# Altium footprint library LimeMicroAltiumLib.PcbLib: 876 footprints (part 40 of 57)
Each footprint in its own frame and in the unit in brackets; x right, y up, seen from the top. Pads: shape width x height; smd on the part's side, far side on the other; paste and mask are expansions set on the pad; w line width, h text height; cw(c..) or ccw(c..) is an arc to the next point about the centre after c.
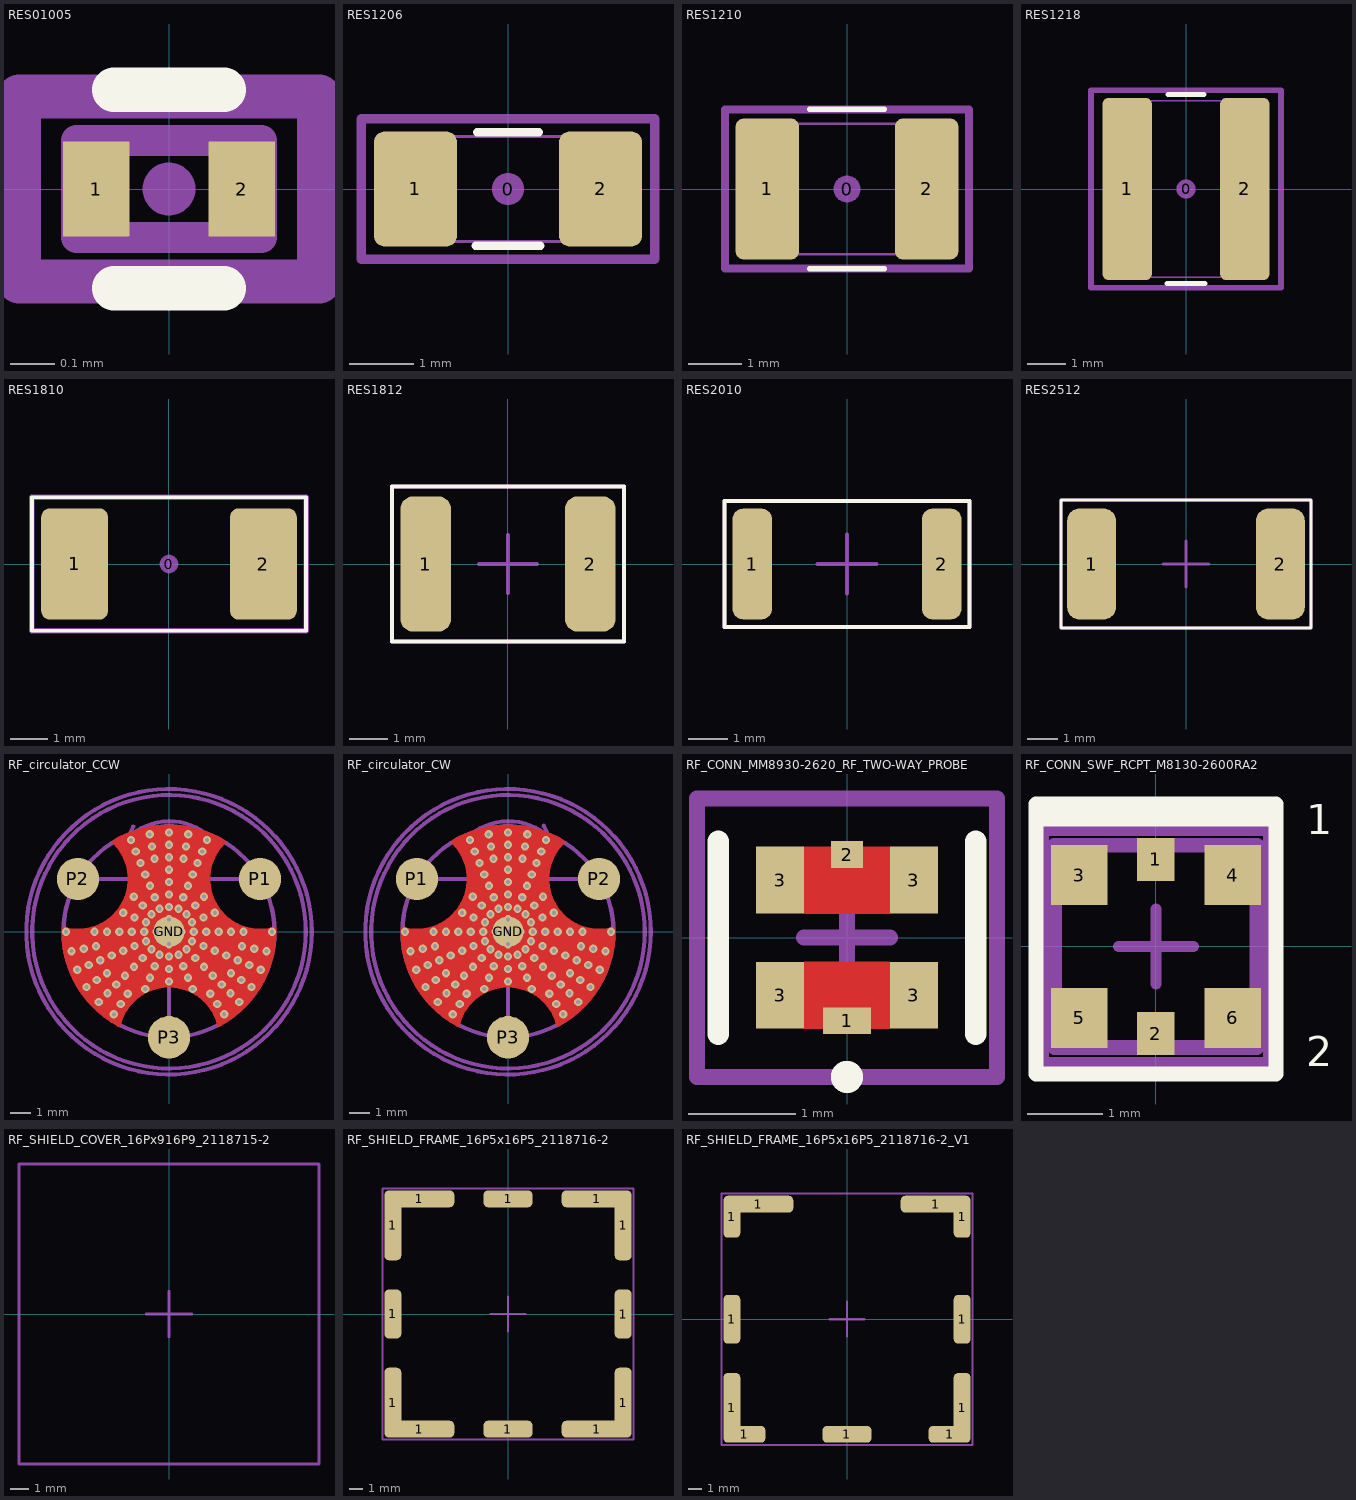
[diagram p39: the footprints below, top view; thin cyan lines are the x and y axes]

## RES01005 [mm]
pads (2):
  rect 0.15x0.215 smd paste+0 mask+0.03: 1(-0.165,0) 2(0.165,0)
Top Overlay:
  lines w0.1: -0.125,-0.225 0.125,-0.225 ; -0.125,0.225 0.125,0.225
Mechanical 13:
  lines w0.07: -0.21,-0.11 -0.21,0.11 0.21,0.11 0.21,-0.11 -0.21,-0.11
Mechanical 15:
  circle w0.07: c0,0 r0.025
  lines w0.1: -0.34,-0.21 -0.34,0.21 0.34,0.21 0.34,-0.21 -0.34,-0.21
  text ".Designator" at 0,0 h0.55
3D body "User Library-res01005.step": height 0.14, standoff 0, extent -0.2,-0.1 0.2,0.1

## RES1206 [mm] "Chip Resistor, Body 3.2x1.6mm, 1206, IPC Medium Density"
height 0.7
pads (3):
  round 0.508 on Mech15: 0(0,0)
  rrect25% 1.3x1.8 smd: 1(-1.45,0) 2(1.45,0)
Top Overlay:
  lines w0.127: -0.508,-0.889 0.508,-0.889 ; -0.483,0.889 0.483,0.889
Mechanical 13:
  lines w0.05: 1.025,-0.824 -1.025,-0.824 1.025,-0.824 ; -1.625,-0.825 -1.625,0.825 -1.025,0.825 -1.025,-0.825 -1.625,-0.825 ; -1.025,0.824 1.025,0.824 -1.025,0.824 ; 1.025,-0.825 1.625,-0.825 1.625,0.825 1.025,0.825 1.025,-0.825
Mechanical 15:
  lines w0.15: -2.3,-1.1 2.3,-1.1 2.3,1.1 -2.3,1.1 -2.3,-1.1
  text ".Designator" at 0,0 h0.55
3D body "RES 1206 (3216 metric).STEP": height 0.69, standoff -0.01, extent -1.625,-0.825 1.625,0.825

## RES1210 [mm] "Chip Resistor, Body 3.2x1.6mm, 1206, IPC Medium Density"
height 0.7
pads (3):
  round 0.508 on Mech15: 0(0,0)
  rrect25% 1.2x2.65 smd: 1(-1.5,0) 2(1.5,0)
Top Overlay:
  lines w0.1: -0.7,-1.5 0.7,-1.5 ; -0.7,1.5 0.7,1.5
Mechanical 13:
  lines w0.05: -1.2,-1.25 -1.6,-1.25 -1.6,1.25 -1.2,1.25 ; 1.2,-1.25 1.6,-1.25 1.6,1.25 1.2,1.25 ; -1.2,-1.23 -1.2,1.23 1.2,1.23 1.2,-1.23 -1.2,-1.23
Mechanical 15:
  lines w0.15: -2.3,-1.5 2.3,-1.5 2.3,1.5 -2.3,1.5 -2.3,-1.5
  text ".Designator" at 0,0 h0.55
3D body "1839737.stp": height 0.54, standoff -0.01, extent -1.55,-1.3 1.55,1.3

## RES1218 [mm] "Chip Resistor, Body 3.2x1.6mm, 1206, IPC Medium Density"
height 0.7
pads (3):
  round 0.508 on Mech15: 0(0,0)
  rrect25% 1.3x4.8 smd: 1(-1.55,0) 2(1.55,0)
Top Overlay:
  lines w0.127: -0.508,-2.489 0.508,-2.489 ; -0.483,2.489 0.483,2.489
Mechanical 13:
  lines w0.05: -1.025,2.325 -1.625,2.325 -1.625,-2.325 -1.025,-2.325 -1.025,2.324 ; 1.025,-2.325 1.537,-2.325 1.5,2.325 1.025,2.325 ; -1.025,2.324 1.025,2.324 ; -1.025,2.324 1.025,2.324 ; 1.025,-2.324 -1.025,-2.324 1.025,-2.324 ; 1.025,-2.324 1.025,2.324
Mechanical 15:
  lines w0.15: -2.5,-2.6 2.5,-2.6 2.5,2.6 -2.5,2.6 -2.5,-2.6
  text ".Designator" at 0,0 h0.55
3D body "User Library-wk732j.step": height 0.61, standoff 0, extent -1.6,-2.3 1.5,2.3

## RES1810 [mm]
height 0.7
pads (3):
  round 0.508 on Mech15: 0(0,0)
  rrect25% 1.8x3 smd: 1(-2.55,0) 2(2.55,0)
Top Overlay:
  lines w0.1: -3.7,-1.8 -3.7,1.8 3.7,1.8 3.7,-1.8 -3.7,-1.8
Mechanical 15:
  lines w0.15: -3.7,-1.8 3.7,-1.8 3.7,1.8 -3.7,1.8 -3.7,-1.8
  text ".Designator" at 0,0 h0.55
3D body: height 2.55, standoff 0, extent 1.4,-1.3 2.3,1.3
3D body: height 2.5, standoff 0, extent -2.25,-1.25 2.25,1.25
3D body: height 2.55, standoff 0, extent -2.3,-1.3 -1.4,1.3

## RES1812 [mm]
pads (2):
  rrect50% 1.3x3.5 smd mask+0.05: 1(-2.125,0) 2(2.125,0)
Top Overlay:
  lines w0.1: -3,-2 3,-2 3,2 -3,2 -3,-2
Mechanical 15:
  lines w0.1: -0.75,0 0,0 ; 0,-0.75 0,0 ; 0,0.75 0,0 ; 0.75,0 0,0 ; -3,-2 -3,2 3,2 3,-2 -3,-2
  text ".Designator" at 0,0 h0.55
3D body "User Library-1812.step": height 0.58, standoff 0.02, extent -2.25,-1.6 2.25,1.6

## RES2010 [mm]
pads (2):
  rrect50% 1x2.8 smd mask+0.05: 1(-2.4,0) 2(2.4,0)
Top Overlay:
  lines w0.1: -3.1,-1.6 3.1,-1.6 3.1,1.6 -3.1,1.6 -3.1,-1.6
Mechanical 15:
  lines w0.1: -0.75,0 0,0 ; 0,-0.75 0,0 ; 0,0.75 0,0 ; 0.75,0 0,0 ; -3.1,-1.6 -3.1,1.6 3.1,1.6 3.1,-1.6 -3.1,-1.6
  text ".Designator" at 0,0 h0.55
3D body "User Library-2010.step": height 0.53, standoff -0.03, extent -2.5,-1.25 2.5,1.25

## RES2512 [mm]
pads (2):
  rrect50% 1.6x3.65 smd mask+0.05: 1(-3.1,0) 2(3.1,0)
Top Overlay:
  lines w0.1: -4.1,-2.1 4.1,-2.1 4.1,2.1 -4.1,2.1 -4.1,-2.1
Mechanical 15:
  lines w0.1: -0.75,0 0,0 ; 0,-0.75 0,0 ; 0,0.75 0,0 ; 0.75,0 0,0 ; -4.1,-2.1 -4.1,2.1 4.1,2.1 4.1,-2.1 -4.1,-2.1
  text ".Designator" at 0,0 h0.55
3D body "User Library-res2512_body.step": height 0.62, standoff 0, extent -3.159,-1.6 3.16,1.6

## RF_circulator_CCW [mm]
pads (4):
  round 1.5 smd mask+0.05: GND(0,0)
  round 2.05 smd mask+0.05: P1(4.4,2.55) P2(-4.4,2.55) P3(0,-5.1)
via 3.991,-2.667 diameter 0.4 hole 0.2
via 3.492,-2.333 diameter 0.4 hole 0.2
via 2.993,-2 diameter 0.4 hole 0.2
via -3.991,-2.667 diameter 0.4 hole 0.2
via -3.492,-2.333 diameter 0.4 hole 0.2
via -2.993,-2 diameter 0.4 hole 0.2
via -0.936,4.707 diameter 0.4 hole 0.2
via -0.819,4.119 diameter 0.4 hole 0.2
via -0.702,3.53 diameter 0.4 hole 0.2
via 0.702,3.53 diameter 0.4 hole 0.2
via 0.819,4.119 diameter 0.4 hole 0.2
via 0.936,4.707 diameter 0.4 hole 0.2
via 2,-2.993 diameter 0.4 hole 0.2
via 2.333,-3.492 diameter 0.4 hole 0.2
via 2.667,-3.991 diameter 0.4 hole 0.2
via 3.53,-0.702 diameter 0.4 hole 0.2
via 4.119,-0.819 diameter 0.4 hole 0.2
via 4.707,-0.936 diameter 0.4 hole 0.2
via -3.531,-0.702 diameter 0.4 hole 0.2
via -4.119,-0.819 diameter 0.4 hole 0.2
via -4.707,-0.936 diameter 0.4 hole 0.2
via -2.546,-2.545 diameter 0.4 hole 0.2
via -2.97,-2.97 diameter 0.4 hole 0.2
via -3.394,-3.394 diameter 0.4 hole 0.2
via 0.689,1.662 diameter 0.4 hole 0.2
via 0.918,2.217 diameter 0.4 hole 0.2
via 1.836,4.434 diameter 0.4 hole 0.2
via 1.607,3.88 diameter 0.4 hole 0.2
via 1.377,3.325 diameter 0.4 hole 0.2
via 1.148,2.771 diameter 0.4 hole 0.2
via 0.459,1.108 diameter 0.4 hole 0.2
via -0.689,1.663 diameter 0.4 hole 0.2
via -0.918,2.217 diameter 0.4 hole 0.2
via -1.837,4.434 diameter 0.4 hole 0.2
via -1.607,3.88 diameter 0.4 hole 0.2
via -1.378,3.326 diameter 0.4 hole 0.2
via -1.148,2.771 diameter 0.4 hole 0.2
via -0.459,1.108 diameter 0.4 hole 0.2
via 1.663,0.688 diameter 0.4 hole 0.2
via 2.217,0.918 diameter 0.4 hole 0.2
via 1.108,0.459 diameter 0.4 hole 0.2
via -1.663,0.689 diameter 0.4 hole 0.2
via -2.217,0.918 diameter 0.4 hole 0.2
via -1.108,0.459 diameter 0.4 hole 0.2
via 0.688,-1.663 diameter 0.4 hole 0.2
via 0.918,-2.217 diameter 0.4 hole 0.2
via 1.148,-2.771 diameter 0.4 hole 0.2
via 0.459,-1.109 diameter 0.4 hole 0.2
via 1.662,-0.689 diameter 0.4 hole 0.2
via 2.217,-0.919 diameter 0.4 hole 0.2
via 4.434,-1.837 diameter 0.4 hole 0.2
via 3.88,-1.607 diameter 0.4 hole 0.2
via 3.325,-1.378 diameter 0.4 hole 0.2
via 2.771,-1.148 diameter 0.4 hole 0.2
via 1.108,-0.459 diameter 0.4 hole 0.2
via -1.663,-0.689 diameter 0.4 hole 0.2
via -2.217,-0.919 diameter 0.4 hole 0.2
via -4.434,-1.837 diameter 0.4 hole 0.2
via -3.88,-1.607 diameter 0.4 hole 0.2
via -3.326,-1.378 diameter 0.4 hole 0.2
via -2.771,-1.148 diameter 0.4 hole 0.2
via -1.108,-0.459 diameter 0.4 hole 0.2
via -0.459,-1.109 diameter 0.4 hole 0.2
via -1.273,-1.273 diameter 0.4 hole 0.2
via -1.697,-1.697 diameter 0.4 hole 0.2
via -0.848,-0.849 diameter 0.4 hole 0.2
via -2.667,-3.991 diameter 0.4 hole 0.2
via -2.333,-3.492 diameter 0.4 hole 0.2
via -2,-2.993 diameter 0.4 hole 0.2
via -2.121,-2.121 diameter 0.4 hole 0.2
via -1.148,-2.771 diameter 0.4 hole 0.2
via 2.121,-2.121 diameter 0.4 hole 0.2
via 2.545,-2.546 diameter 0.4 hole 0.2
via 2.969,-2.97 diameter 0.4 hole 0.2
via 3.394,-3.394 diameter 0.4 hole 0.2
via -0.849,0.848 diameter 0.4 hole 0.2
via -1.697,1.697 diameter 0.4 hole 0.2
via -1.273,1.273 diameter 0.4 hole 0.2
via 0.848,0.849 diameter 0.4 hole 0.2
via 1.697,1.697 diameter 0.4 hole 0.2
via 1.273,1.273 diameter 0.4 hole 0.2
via 0.848,-0.848 diameter 0.4 hole 0.2
via 1.697,-1.697 diameter 0.4 hole 0.2
via 1.273,-1.273 diameter 0.4 hole 0.2
via -0.918,-2.217 diameter 0.4 hole 0.2
via -0.689,-1.663 diameter 0.4 hole 0.2
via 0,-1.8 diameter 0.4 hole 0.2
via 0,-2.4 diameter 0.4 hole 0.2
via 0,-1.2 diameter 0.4 hole 0.2
via 1.2,0 diameter 0.4 hole 0.2
via 0,0 diameter 0.4 hole 0.2
via 0.6,0 diameter 0.4 hole 0.2
via 4.975,0 diameter 0.4 hole 0.2
via 3.6,0 diameter 0.4 hole 0.2
via 3,0 diameter 0.4 hole 0.2
via 2.4,0 diameter 0.4 hole 0.2
via 1.8,0 diameter 0.4 hole 0.2
via -1.2,0 diameter 0.4 hole 0.2
via -1.8,0 diameter 0.4 hole 0.2
via -2.4,0 diameter 0.4 hole 0.2
via -3,0 diameter 0.4 hole 0.2
via -3.6,0 diameter 0.4 hole 0.2
via -4.975,0 diameter 0.4 hole 0.2
via 0,3.6 diameter 0.4 hole 0.2
via 0,4.2 diameter 0.4 hole 0.2
via 0,4.8 diameter 0.4 hole 0.2
via 0,3 diameter 0.4 hole 0.2
via 0,2.4 diameter 0.4 hole 0.2
via 0,1.8 diameter 0.4 hole 0.2
via 0,1.2 diameter 0.4 hole 0.2
via -0.6,0 diameter 0.4 hole 0.2
via 0,-0.6 diameter 0.4 hole 0.2
via 0,0.6 diameter 0.4 hole 0.2
Top Layer:
  region: -2.425,-4.494
  region: -2.45,0.1 -5.137,0.1 -5.143,-0.251 -5.061,-0.95 -4.885,-1.63 -4.617,-2.281 -4.263,-2.888 -3.83,-3.442 -3.326,-3.932 -2.759,-4.348 -2.45,-4.516
  region: 2.449,0.1 5.135,0.1 5.142,-0.251 5.059,-0.949 4.882,-1.628 4.614,-2.278 4.26,-2.885 3.827,-3.438 3.323,-3.927 2.757,-4.342 2.449,-4.51
  region: 0.05,4.375 -2.674,4.375 -2.369,4.556 -1.718,4.834 -1.035,5.021 -0.333,5.116 0.375,5.116 1.077,5.021 1.759,4.834 2.411,4.556 2.715,4.375
  region: -3.793,0.1
  region: -2.684,4.375 -2.125,3.7 -1.875,2.875 -1.9,2.025 -2.15,1.4 -2.45,0.925 -3,0.425 -3.793,0.1 -3.65,-1 0,-1 0,4.375
  region: 2.684,4.375 2.125,3.7 1.875,2.875 1.9,2.025 2.15,1.4 2.45,0.925 3,0.425 3.793,0.1 3.65,-1 0,-1 0,4.375
  region: -2.425,-4.494 -2.2,-3.85 -1.7,-3.225 -1.025,-2.8 -0.475,-2.625 0,-2.625 0,-1 -2.605,-1 -2.605,-4.494
  region: 2.425,-4.494 2.2,-3.85 1.7,-3.225 1.025,-2.8 0.475,-2.625 0,-2.625 0,-1 2.605,-1 2.605,-4.494
  lines w0.2: -5.104,0.148 ccw(c0,0) -2.425,-4.494 cw(c0,-5.1) 2.424,-4.488 ccw(c-0.001,0.006) 5.103,0.154 ; -5.093,0.148 ccw(c-4.4,2.55) -2.657,4.342 cw(c0,0) 2.657,4.342 ccw(c4.4,2.55) 5.093,0.148
Top Paste:
  drawing of 48 lines, arcs and shapes, not listed
Top Solder:
  drawing of 48 lines, arcs and shapes, not listed
Mechanical 13:
  circle w0.2: c0,0 r5.1
  circle w0.2: c0,0 r6.61
  lines w0.2: -4.4,2.55 4.4,2.55 ; 0,-5.1 0,0 0,2.55
Mechanical 15:
  circle w0.2: c0,0 r6.899
  lines w0.2: -1.73,5.079 -2.005,4.504 ; -1.455,4.579 -2.005,4.504 ; -0.925,0 0,0 ; 0,-0.925 0,0 ; 0,0.925 0,0 ; 0.925,0 0,0 ; 2,4.55 ccw(c0.021,2.479) -2.005,4.504
  text ".Designator" at 0,0 h0.55
  text "P2" at -4.8,2.35 h0.55
  text "P1" at 4.1,2.35 h0.55
  text "P3" at -0.45,-5.35 h0.55
3D body: height 7, standoff 0, extent -5,-5 5,5

## RF_circulator_CW [mm]
pads (4):
  round 1.5 smd mask+0.05: GND(0,0)
  round 2.05 smd mask+0.05: P1(-4.4,2.55) P2(4.4,2.55) P3(0,-5.1)
via 0,0.6 diameter 0.4 hole 0.2
via 0,-0.6 diameter 0.4 hole 0.2
via -0.6,0 diameter 0.4 hole 0.2
via 0,1.2 diameter 0.4 hole 0.2
via 0,1.8 diameter 0.4 hole 0.2
via 0,2.4 diameter 0.4 hole 0.2
via 0,3 diameter 0.4 hole 0.2
via 0,4.8 diameter 0.4 hole 0.2
via 0,4.2 diameter 0.4 hole 0.2
via 0,3.6 diameter 0.4 hole 0.2
via -4.975,0 diameter 0.4 hole 0.2
via -3.6,0 diameter 0.4 hole 0.2
via -3,0 diameter 0.4 hole 0.2
via -2.4,0 diameter 0.4 hole 0.2
via -1.8,0 diameter 0.4 hole 0.2
via -1.2,0 diameter 0.4 hole 0.2
via 1.8,0 diameter 0.4 hole 0.2
via 2.4,0 diameter 0.4 hole 0.2
via 3,0 diameter 0.4 hole 0.2
via 3.6,0 diameter 0.4 hole 0.2
via 4.975,0 diameter 0.4 hole 0.2
via 0.6,0 diameter 0.4 hole 0.2
via 0,0 diameter 0.4 hole 0.2
via 1.2,0 diameter 0.4 hole 0.2
via 0,-1.2 diameter 0.4 hole 0.2
via 0,-2.4 diameter 0.4 hole 0.2
via 0,-1.8 diameter 0.4 hole 0.2
via -0.689,-1.663 diameter 0.4 hole 0.2
via -0.918,-2.217 diameter 0.4 hole 0.2
via 1.273,-1.273 diameter 0.4 hole 0.2
via 1.697,-1.697 diameter 0.4 hole 0.2
via 0.848,-0.848 diameter 0.4 hole 0.2
via 1.273,1.273 diameter 0.4 hole 0.2
via 1.697,1.697 diameter 0.4 hole 0.2
via 0.848,0.849 diameter 0.4 hole 0.2
via -1.273,1.273 diameter 0.4 hole 0.2
via -1.697,1.697 diameter 0.4 hole 0.2
via -0.849,0.848 diameter 0.4 hole 0.2
via 3.394,-3.394 diameter 0.4 hole 0.2
via 2.969,-2.97 diameter 0.4 hole 0.2
via 2.545,-2.546 diameter 0.4 hole 0.2
via 2.121,-2.121 diameter 0.4 hole 0.2
via -1.148,-2.771 diameter 0.4 hole 0.2
via -2.121,-2.121 diameter 0.4 hole 0.2
via -2,-2.993 diameter 0.4 hole 0.2
via -2.333,-3.492 diameter 0.4 hole 0.2
via -2.667,-3.991 diameter 0.4 hole 0.2
via -0.848,-0.849 diameter 0.4 hole 0.2
via -1.697,-1.697 diameter 0.4 hole 0.2
via -1.273,-1.273 diameter 0.4 hole 0.2
via -0.459,-1.109 diameter 0.4 hole 0.2
via -1.108,-0.459 diameter 0.4 hole 0.2
via -2.771,-1.148 diameter 0.4 hole 0.2
via -3.326,-1.378 diameter 0.4 hole 0.2
via -3.88,-1.607 diameter 0.4 hole 0.2
via -4.434,-1.837 diameter 0.4 hole 0.2
via -2.217,-0.919 diameter 0.4 hole 0.2
via -1.663,-0.689 diameter 0.4 hole 0.2
via 1.108,-0.459 diameter 0.4 hole 0.2
via 2.771,-1.148 diameter 0.4 hole 0.2
via 3.325,-1.378 diameter 0.4 hole 0.2
via 3.88,-1.607 diameter 0.4 hole 0.2
via 4.434,-1.837 diameter 0.4 hole 0.2
via 2.217,-0.919 diameter 0.4 hole 0.2
via 1.662,-0.689 diameter 0.4 hole 0.2
via 0.459,-1.109 diameter 0.4 hole 0.2
via 1.148,-2.771 diameter 0.4 hole 0.2
via 0.918,-2.217 diameter 0.4 hole 0.2
via 0.688,-1.663 diameter 0.4 hole 0.2
via -1.108,0.459 diameter 0.4 hole 0.2
via -2.217,0.918 diameter 0.4 hole 0.2
via -1.663,0.689 diameter 0.4 hole 0.2
via 1.108,0.459 diameter 0.4 hole 0.2
via 2.217,0.918 diameter 0.4 hole 0.2
via 1.663,0.688 diameter 0.4 hole 0.2
via -0.459,1.108 diameter 0.4 hole 0.2
via -1.148,2.771 diameter 0.4 hole 0.2
via -1.378,3.326 diameter 0.4 hole 0.2
via -1.607,3.88 diameter 0.4 hole 0.2
via -1.837,4.434 diameter 0.4 hole 0.2
via -0.918,2.217 diameter 0.4 hole 0.2
via -0.689,1.663 diameter 0.4 hole 0.2
via 0.459,1.108 diameter 0.4 hole 0.2
via 1.148,2.771 diameter 0.4 hole 0.2
via 1.377,3.325 diameter 0.4 hole 0.2
via 1.607,3.88 diameter 0.4 hole 0.2
via 1.836,4.434 diameter 0.4 hole 0.2
via 0.918,2.217 diameter 0.4 hole 0.2
via 0.689,1.662 diameter 0.4 hole 0.2
via -3.394,-3.394 diameter 0.4 hole 0.2
via -2.97,-2.97 diameter 0.4 hole 0.2
via -2.546,-2.545 diameter 0.4 hole 0.2
via -4.707,-0.936 diameter 0.4 hole 0.2
via -4.119,-0.819 diameter 0.4 hole 0.2
via -3.531,-0.702 diameter 0.4 hole 0.2
via 4.707,-0.936 diameter 0.4 hole 0.2
via 4.119,-0.819 diameter 0.4 hole 0.2
via 3.53,-0.702 diameter 0.4 hole 0.2
via 2.667,-3.991 diameter 0.4 hole 0.2
via 2.333,-3.492 diameter 0.4 hole 0.2
via 2,-2.993 diameter 0.4 hole 0.2
via 0.936,4.707 diameter 0.4 hole 0.2
via 0.819,4.119 diameter 0.4 hole 0.2
via 0.702,3.53 diameter 0.4 hole 0.2
via -0.702,3.53 diameter 0.4 hole 0.2
via -0.819,4.119 diameter 0.4 hole 0.2
via -0.936,4.707 diameter 0.4 hole 0.2
via -2.993,-2 diameter 0.4 hole 0.2
via -3.492,-2.333 diameter 0.4 hole 0.2
via -3.991,-2.667 diameter 0.4 hole 0.2
via 2.993,-2 diameter 0.4 hole 0.2
via 3.492,-2.333 diameter 0.4 hole 0.2
via 3.991,-2.667 diameter 0.4 hole 0.2
Top Layer:
  region: 2.425,-4.494 2.2,-3.85 1.7,-3.225 1.025,-2.8 0.475,-2.625 0,-2.625 0,-1 2.605,-1 2.605,-4.494
  region: -2.425,-4.494 -2.2,-3.85 -1.7,-3.225 -1.025,-2.8 -0.475,-2.625 0,-2.625 0,-1 -2.605,-1 -2.605,-4.494
  region: 2.684,4.375 2.125,3.7 1.875,2.875 1.9,2.025 2.15,1.4 2.45,0.925 3,0.425 3.793,0.1 3.65,-1 0,-1 0,4.375
  region: -2.684,4.375 -2.125,3.7 -1.875,2.875 -1.9,2.025 -2.15,1.4 -2.45,0.925 -3,0.425 -3.793,0.1 -3.65,-1 0,-1 0,4.375
  region: -3.793,0.1
  region: 0.05,4.375 -2.674,4.375 -2.369,4.556 -1.718,4.834 -1.035,5.021 -0.333,5.116 0.375,5.116 1.077,5.021 1.759,4.834 2.411,4.556 2.715,4.375
  region: 2.449,0.1 5.135,0.1 5.142,-0.251 5.059,-0.949 4.882,-1.628 4.614,-2.278 4.26,-2.885 3.827,-3.438 3.323,-3.927 2.757,-4.342 2.449,-4.51
  region: -2.45,0.1 -5.137,0.1 -5.143,-0.251 -5.061,-0.95 -4.885,-1.63 -4.617,-2.281 -4.263,-2.888 -3.83,-3.442 -3.326,-3.932 -2.759,-4.348 -2.45,-4.516
  region: -2.425,-4.494
  lines w0.2: -5.104,0.148 ccw(c0,0) -2.425,-4.494 cw(c0,-5.1) 2.424,-4.488 ccw(c-0.001,0.006) 5.103,0.154 ; -5.093,0.148 ccw(c-4.4,2.55) -2.657,4.342 cw(c0,0) 2.657,4.342 ccw(c4.4,2.55) 5.093,0.148
Top Paste:
  drawing of 48 lines, arcs and shapes, not listed
Top Solder:
  drawing of 48 lines, arcs and shapes, not listed
Mechanical 13:
  circle w0.2: c0,0 r6.61
  circle w0.2: c0,0 r5.1
  lines w0.2: -4.4,2.55 4.4,2.55 ; 0,-5.1 0,0 0,2.55
Mechanical 15:
  circle w0.2: c0,0 r6.899
  lines w0.2: -2.005,4.504 cw(c0.021,2.479) 2,4.55 ; -0.925,0 0,0 ; 0,-0.925 0,0 ; 0,0.925 0,0 ; 0.925,0 0,0 ; 1.45,4.625 2,4.55 ; 1.725,5.125 2,4.55
  text "P3" at -0.45,-5.35 h0.55
  text "P1" at -4.75,2.325 h0.55
  text "P2" at 4.05,2.3 h0.55
  text ".Designator" at 0,0 h0.55
3D body: height 7, standoff 0, extent -5,-5 5,5

## RF_CONN_MM8930-2620_RF_TWO-WAY_PROBE [mm]
pads (6):
  rect 0.45x0.25 smd mask+0.05: 1(0,-0.775)
  rect 0.3x0.25 smd mask+0.05: 2(0,0.775)
  rect 0.45x0.625 smd mask+0.05: 3(-0.625,-0.537) 3(-0.625,0.537) 3(0.625,-0.537) 3(0.625,0.537)
Top Layer:
  pour cut-out: -0.4,0.85 -0.4,0.225 0.4,0.225 0.4,0.85
  pour cut-out: -0.4,-0.85 -0.4,-0.225 0.4,-0.225 0.4,-0.85
Top Overlay:
  circle w0.25: c0,-1.3 r0.025
  lines w0.2: -1.2,-0.9 -1.2,0.9 ; 1.2,-0.9 1.2,0.9
Mechanical 15:
  lines w0.15: -0.4,0 0,0 ; 0,-0.4 0,0 ; 0,0.4 0,0 ; 0.4,0 0,0 ; -1.4,-1.3 1.4,-1.3 1.4,1.3 -1.4,1.3 -1.4,-1.3
  text "OUT" at -0.5,0.6 h0.4
  text "IN" at -0.3,-1 h0.4
  text ".Designator" at 0,0 h0.55
3D body "Conn_Murata_Electronics_MM8930-2620RJ4_eec.STEP": height 0.25, standoff 0, extent -1,-1 1,1

## RF_CONN_SWF_RCPT_M8130-2600RA2 [mm]
pads (6):
  rect 0.5x0.58 smd mask+0.05: 1(0,1.16) 2(0,-1.16)
  rect 0.75x0.8 smd mask+0.05: 3(-1.025,0.95) 4(1.025,0.95) 5(-1.025,-0.95) 6(1.025,-0.95)
Top Overlay:
  region: -1.6,1.7 -1.6,1.9 1.6,1.9 1.6,1.7
  lines w0.2: -1.6,1.7 -1.6,1.9 1.6,1.9 1.6,1.7 ; -1.6,1.7 1.6,1.7 ; -1.6,1.7 -1.6,-1.7 1.6,-1.7 1.6,1.7
  text "2" at 2,-1.6 h0.4
  text "1" at 2,1.5 h0.4
Mechanical 13:
  lines w0.2: -1.35,-1.35 -1.35,1.35 1.35,1.35 1.35,-1.35 -1.35,-1.35
Mechanical 15:
  lines w0.15: -0.5,0 0,0 ; 0,-0.5 0,0 ; 0,0.5 0,0 ; 0.5,0 0,0 ; -1.5,-1.55 -1.5,1.55 1.5,1.55 1.5,-1.55 -1.5,-1.55
  text "2" at -0.1,-1.3 h0.4
  text "1" at -0.1,0.8 h0.4
  text ".Designator" at 0,0 h0.55
3D body "Conn_Murata_MM8130-2600RA2_eec.STEP": height 0.25, standoff 0, extent -1.5,-1.55 1.5,1.55

## RF_SHIELD_COVER_16Px916P9_2118715-2 [mm]
Mechanical 15:
  lines w0.15: -1.25,0 0,0 ; 0,-1.25 0,0 ; 0,1.25 0,0 ; 1.25,0 0,0 ; -8.25,-8.25 -8.25,8.25 8.25,8.25 8.25,-8.25 -8.25,-8.25
  text ".Designator" at 0,0 h0.55
  text "RF shield cover" at -3.5,-8 h0.55
3D body "2118715-2--3DModel-STEP-1.STEP": height 4, standoff 2, extent -8.45,-8.45 8.45,8.45

## RF_SHIELD_FRAME_16P5x16P5_2118716-2 [mm]
pads (12):
  rrect50% 1.2x3.5 smd mask+0.05: 1(-8.25,0) 1(8.25,0)
  rrect50% 1.2x5 smd mask+0.05: 1(-8.25,-6.35) 1(-8.25,6.35) 1(8.25,-6.35) 1(8.25,6.35)
  rrect50% 5x1.2 smd mask+0.05: 1(-6.35,8.25) 1(-6.35,-8.25) 1(6.35,-8.25) 1(6.35,8.25)
  rrect50% 3.5x1.2 smd mask+0.05: 1(0,-8.25) 1(0,8.25)
Mechanical 15:
  lines w0.15: -1.25,0 0,0 ; 0,-1.25 0,0 ; 0,1.25 0,0 ; 1.25,0 0,0 ; -9,-9 9,-9 9,9 -9,9 -9,-9
  text "RF shield frame" at -3.75,-8.5 h0.55
  text ".Designator" at 0,0 h0.55
3D body "2118716-2--3DModel-STEP-1.STEP": height 3.6, standoff 0, extent -8.25,-8.25 8.25,8.25

## RF_SHIELD_FRAME_16P5x16P5_2118716-2_V1 [mm]
pads (11):
  rrect50% 1.2x3.5 smd mask+0.05: 1(-8.25,0) 1(8.25,0)
  rrect50% 1.2x5 smd mask+0.05: 1(-8.25,-6.35) 1(8.25,-6.35)
  rrect50% 1.2x3 smd mask+0.05: 1(-8.25,7.35) 1(8.25,7.35)
  rrect50% 3x1.2 smd mask+0.05: 1(-7.35,-8.25) 1(7.35,-8.25)
  rrect50% 5x1.2 smd mask+0.05: 1(-6.35,8.25) 1(6.35,8.25)
  rrect50% 3.5x1.2 smd mask+0.05: 1(0,-8.25)
Mechanical 15:
  lines w0.15: -1.25,0 0,0 ; 0,-1.25 0,0 ; 0,1.25 0,0 ; 1.25,0 0,0 ; -9,-9 9,-9 9,9 -9,9 -9,-9
  text "RF shield frame" at -3.75,-8.5 h0.55
  text ".Designator" at 0,0 h0.55
3D body "2118716-2--3DModel-STEP-1.STEP": height 3.6, standoff 0, extent -8.25,-8.25 8.25,8.25

## RFI_SHIELD_21.2x21.2 [mm] "RFI SHIELD 36003200"
height 3
3D body: height 3, standoff 0, extent 0.225,21.55 21.538,22.075
3D body: height 3, standoff 0, extent 21.538,-0.25 22.063,22.075
3D body: height 3, standoff 0, extent -0.3,-0.25 0.225,22.075
3D body: height 3, standoff 0, extent 0.225,-0.25 21.538,0.275
3D body: height 3, standoff 2.9, extent 0.225,0.275 21.538,21.55